# Altium schematic symbol library Mechanical.SchLib: 6 symbols
Pins are listed as number, name and electrical type; pins without a type are passive.

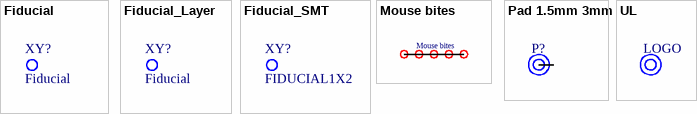
[diagram p0: symbols Fiducial to UL]

## Fiducial
designator XY?
Code: Not Use
footprint Fiducial SMT Panel
footprint Fiducial - Positioning hole Panel SMT
footprint FIDUCIAL1SM2 (FIDUCIAL 1mm Pad, 2mm SolderMask)
footprint FIDUCIAL1SM3 (FIDUCIAL 1mm Pad, 3mm SolderMask)

## Fiducial_Layer
designator XY?, comment Fiducial
Code: Not Use
footprint FIDUCIAL1SM2_Layer (FIDUCIAL 1mm Pad, 2mm SolderMask)

## Fiducial_SMT
designator XY?, comment FIDUCIAL1X2
By SMT; Code: Not Use
footprint FIDUCIAL-1X2 (FIDUCIAL 1mm Pad, 2mm SolderMask. By SMT)

## Mouse bites
designator MB?  (value not drawn)  (no BOM)
Designed by: TranLuyen; Rule: UNIONINDEX=0|RULEKIND=Clearance|NETSCOPE=DifferentNets|LAYERKIND=SameLayer|NAME=Schematic Clearance Constraint|GAP=1mil|GENERICCLEARANCE=1mil|IGNOREPADTOPADCLEARANCEINFOOTPRINT=FALSE|OBJECTCLEARANCES= |UNIT=Imperial
footprint Mouse bites L7.5xD0.5
footprint Mouse bites L4xD0.5 button holder
footprint Mouse bites L4.5xD0.5

## Pad 1.5mm 3mm
designator P?, comment Pad 1.5mm  (value not drawn)  (no BOM)
footprint Pad 1.5mm 3mm
pins: 1

## UL
designator LOGO, comment LOGO  (value not drawn)  (no BOM)
footprint LOGO UL